# Altium footprint library Isolated_amplifiers.PcbLib: 2 footprints
Each footprint in its own frame and in the unit in brackets; x right, y up, seen from the top. Pads: shape width x height; smd on the part's side, far side on the other; paste and mask are expansions set on the pad; w line width, h text height; cw(c..) or ccw(c..) is an arc to the next point about the centre after c.
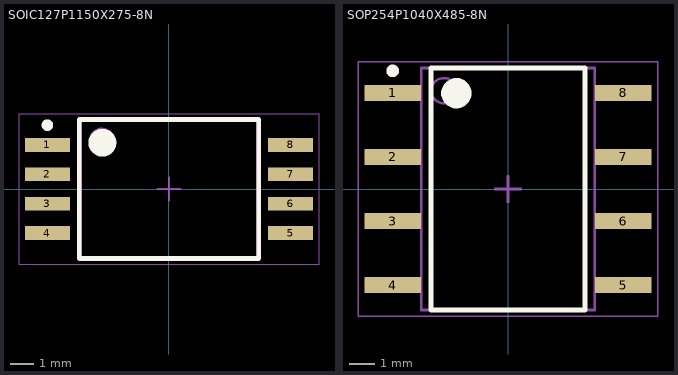
[diagram p0: the footprints below, top view; thin cyan lines are the x and y axes]

## SOIC127P1150X275-8N [mm] "SOIC, 8-Leads, Body 5,85x7,50mm, Pitch 1,27mm, IPC Medium Density"
height 2.75
pads (8):
  rect 1.95x0.6 smd: 1(-5.25,1.905) 2(-5.25,0.635) 3(-5.25,-0.635) 4(-5.25,-1.905) 5(5.25,-1.905) 6(5.25,-0.635) 7(5.25,0.635) 8(5.25,1.905)
Top Overlay:
  circle w0.6: c-2.875,2 r0.3
  circle w0.25: c-5.25,2.755 r0.125
  lines w0.2: -3.875,-3 3.875,-3 3.875,3 -3.875,3 -3.875,-3
  text ".DESIGNATOR" at -6.468,3.346 h1
Mechanical 13:
  circle w0.1: c-2.9,2.1 r0.5
  lines w0.1: -3.8,-3 3.8,-3 3.8,3 -3.8,3 -3.8,-3
Mechanical 15:
  lines w0.05: -6.475,-3.25 6.475,-3.25 6.475,3.25 -6.475,3.25 -6.475,-3.25
  lines w0.1: -0.5,0 0.5,0 ; 0,-0.5 0,0.5
3D body "SOIC127P1150X275-8N.step": height 2.75, standoff 0, extent -5.75,-3 5.75,3

## SOP254P1040X485-8N [mm] "SOP, 8-Leads, Body 9,29x6,62mm, Pitch 2,54mm, IPC Medium Density"
height 4.85
pads (8):
  rect 2.25x0.65 smd: 1(-4.575,3.81) 2(-4.575,1.27) 3(-4.575,-1.27) 4(-4.575,-3.81) 5(4.575,-3.81) 6(4.575,-1.27) 7(4.575,1.27) 8(4.575,3.81)
Top Overlay:
  circle w0.25: c-4.575,4.685 r0.125
  circle w0.6: c-2.05,3.8 r0.3
  lines w0.2: -3.05,-4.8 -3.05,4.8 3.05,4.8 3.05,-4.8 -3.05,-4.8
  text ".DESIGNATOR" at -5.954,5.227 h1
Mechanical 13:
  circle w0.1: c-2.55,3.9 r0.5
  lines w0.1: -3.45,-4.8 -3.45,4.8 3.45,4.8 3.45,-4.8 -3.45,-4.8
Mechanical 15:
  lines w0.05: -5.95,-5.05 -5.95,5.05 5.95,5.05 5.95,-5.05 -5.95,-5.05
  lines w0.1: -0.5,0 0.5,0 ; 0,-0.5 0,0.5
3D body "SOP254P1040X485-8N.step": height 4.85, standoff 0, extent -5.2,-4.8 5.2,4.8